# Altium schematic symbol library FerriteBead.SchLib: 1 symbol
Pins are listed as number, name and electrical type; pins without a type are passive.

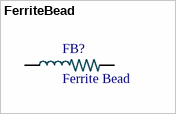
[diagram p0: symbol FerriteBead]

## FerriteBead
designator FB?, comment Ferrite Bead
www.lionelectronic.ir / HCB3216KF-101T30; MP: BLM31KN102SN1L; Package: None; Price: None; Value: *; Availability: Unavailable
footprint FB1206 (BEADC3216X180N)
pins: 1, 2